# Altium integrated library Phonix_2pin.IntLib: 1 symbol
Pins are listed as number, name and electrical type; pins without a type are passive.

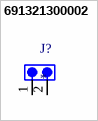
[diagram p0: symbol 691321300002]

## 691321300002
designator J?
2 Position Terminal Block Header, Male Pins, Shrouded (4 Side) 0.150 (3.81mm) Vertical Through Hole; MP: 691321300002; MF: Wurth Electronics; Price: None; Availability: Warning; Check_prices: https://www.snapeda.com/parts/691321300002/Wurth%20Electronics%20Inc./view-part/1288250/?ref=eda; Package: None; SnapEDA_Link: https://www.snapeda.com/parts/691321300002/Wurth%20Electronics%20Inc./view-part/1288250/?ref=snap; Value: *; Purchase-URL: https://pricing.snapeda.com/search/part/691321300002/?ref=eda
footprint 691321300002
pins: 1, 2